# Altium schematic symbol library AI_NODE.SCHLIB: 18 symbols
Pins are listed as number, name and electrical type; pins without a type are passive.

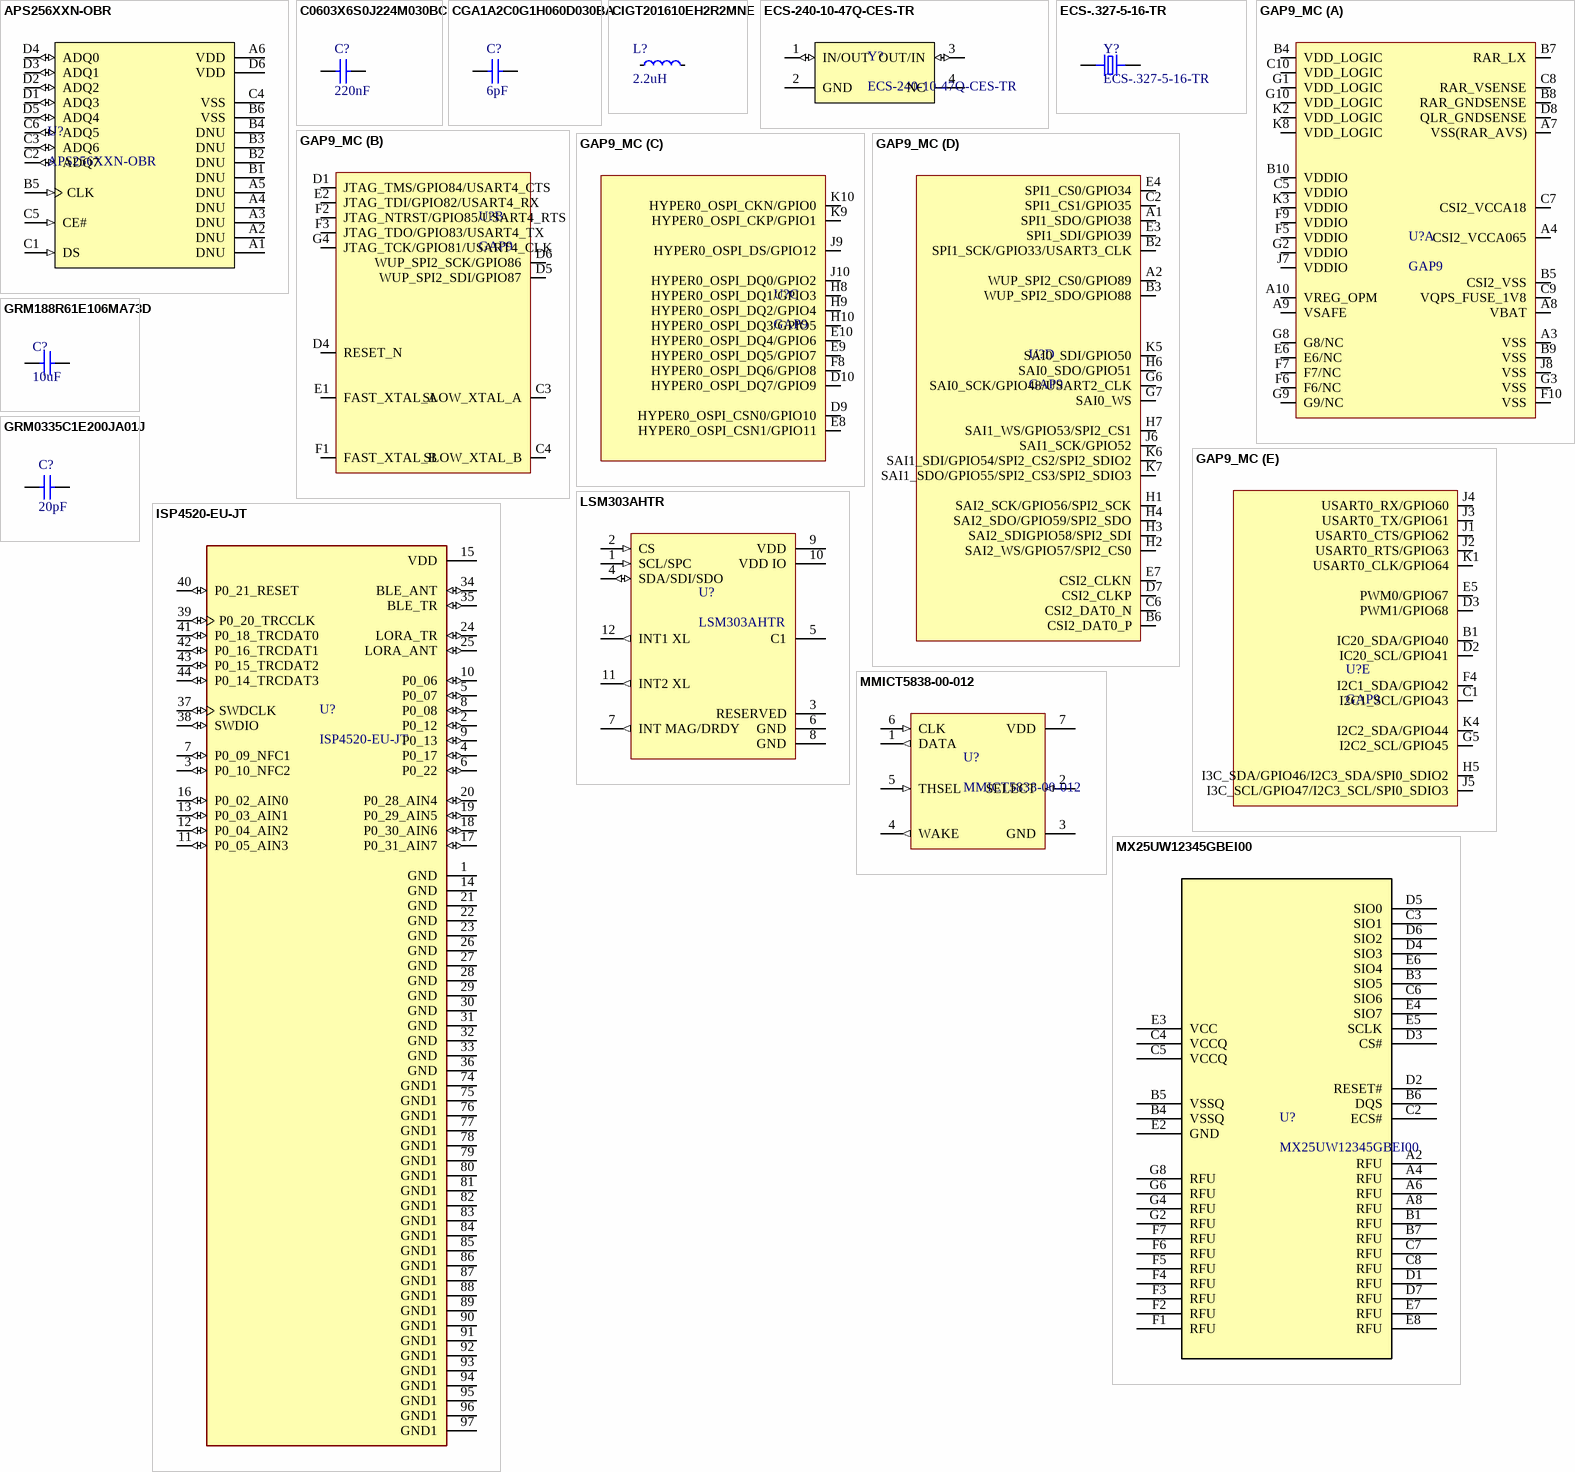
[diagram p0: symbols APS256XXN-OBR to MX25UW12345GBEI00]

## APS256XXN-OBR
designator U?
No Description Available; Mfr_Name: AP Memory; Manufacturer_Part_Number: APS256XXN-OBR-BG; Copyright: Copyright (C) 2022 Ultra Librarian. All rights reserved.; RefDes: RefDes; Type: DEV
footprint WLCSP24
pins: A1 DNU, A2 DNU, A3 DNU, A4 DNU, A5 DNU, A6 VDD, B1 DNU, B2 DNU, B3 DNU, B4 DNU, B5 CLK (in), B6 VSS, C1 DS (in), C2 ADQ7 (io), C3 ADQ6 (io), C4 VSS, C5 CE# (in), C6 ADQ5 (io), D1 ADQ3 (io), D2 ADQ2 (io), D3 ADQ1 (io), D4 ADQ0 (io), D5 ADQ4 (io), D6 VDD

## C0603X6S0J224M030BC
designator C?, comment 220nF
CAP CER 0.22UF 6.3V X6S 0201; Manufacturer: TDK; Manufacturer Part Number: C0603X6S0J224M030BC; Dielectric Material: Ceramic; Tolerance: 20%; Supplier: Digi-Key; Supplier Part Number: 445-8003-6-ND; RoHS: Yes; Category: Ceramic Capacitors; Stock: 29480; Pricing: 1=0.18, 10=0.121, 50=0.0728, 100=0.0614, 500=0.04202, 1000=0.03717, 2500=0.03555, 5000=0.03232 (USD); Mounting Technology: Surface Mount; Case/Package: 0201; Case Code (Metric): 0603; Case Code (Imperial): 0201; Min Operating Temperature: -55°C; Max Operating Temperature: 105°C; Packaging: Tape and Reel; Value: 220nF; Dielectric: X6S; Package Quantity: 1; Voltage Rating: 6.3V; Series: C; Construction: Flat; Length: 0.6mm; Width: 0.012inch; Height: 0.3mm; Depth: 0.3mm; Thickness: 300um; Radiation Hardening: No; Reach SVHC Compliant: No; Lead Free: Lead Free; RoHS Compliant: Yes; ComponentLink1URL: https://datasheet.ciiva.com/26919/getdatasheetpartid-754557-26919175.pdf?src-supplier=Verical; ComponentLink1Description: https://datasheet.ciiva.com/26919/getdatasheetpartid-754557-26919175.pdf?src-supplier=Verical; ComponentLink2URL: https://datasheet.ciiva.com/6291/tdkmlcccaprange-6291929.pdf?src-supplier=Digi-Key; ComponentLink2Description: https://datasheet.ciiva.com/6291/tdkmlcccaprange-6291929.pdf?src-supplier=Digi-Key; ComponentLink3URL: https://datasheet.ciiva.com/6291/tdkmlcccaprange-6291931.pdf?src-supplier=Digi-Key; ComponentLink3Description: https://datasheet.ciiva.com/6291/tdkmlcccaprange-6291931.pdf?src-supplier=Digi-Key; ComponentLink4URL: https://datasheet.ciiva.com/6291/tdkmlcccaprange-6291933.pdf?src-supplier=Digi-Key; ComponentLink4Description: https://datasheet.ciiva.com/6291/tdkmlcccaprange-6291933.pdf?src-supplier=Digi-Key
footprint CAPC0603X33X15LL03T05 (Chip Capacitor, 2-Leads, Body 0.60x0.30mm, IPC High Density)
footprint CAPC0603X33X15NL03T05 (Chip Capacitor, 2-Leads, Body 0.60x0.30mm, IPC Medium Density)
footprint CAPC0603X33X15ML03T05 (Chip Capacitor, 2-Leads, Body 0.60x0.30mm, IPC Low Density)
pins: 1, 2
1 alternate drawing of the same symbol

## CGA1A2C0G1H060D030BA
designator C?, comment 6pF
Cap Ceramic 6pF 50V C0G 0.5pF SMD 0201 125°C Punched Paper T/R; Manufacturer: TDK; Manufacturer Part Number: CGA1A2C0G1H060D030BA; Supplier: Digi-Key; Supplier Part Number: 445-12055-6-ND; RoHS: Yes; Category: Ceramic Capacitors; Stock: 28912; Pricing: 1=0.11, 10=0.078, 50=0.0424, 100=0.0346, 500=0.02474, 1000=0.01944, 2500=0.01768, 5000=0.01626 (USD); Mounting Technology: Surface Mount; Case/Package: 0201; Case Code (Imperial): 0201; Case Code (Metric): 0603; Weight: 6E-06oz; Min Operating Temperature: -55°C; Max Operating Temperature: 125°C; Voltage Rating (DC): 50V; Packaging: Tape and Reel; Package Quantity: 15000; Value: 6pF; Voltage Rating: 50V; Dielectric: C0G; Termination: SMD/SMT; Series: CGA; Length: 0.024inch; Width: 0.012inch; Height: 0.3mm; Thickness: 0.012inch; Ratings: AEC-Q200; RoHS Compliant: Yes; ComponentLink1URL: http://www.mouser.com/ds/2/400/lcc_automotive_general_en-843974.pdf?src-supplier=Mouser; ComponentLink1Description: http://www.mouser.com/ds/2/400/lcc_automotive_general_en-843974.pdf?src-supplier=Mouser; ComponentLink2URL: https://product.tdk.com/info/en/documents/chara_sheet/CGA1A2C0G1H060D030BA.pdf?src-supplier=Digi-Key; ComponentLink2Description: https://product.tdk.com/info/en/documents/chara_sheet/CGA1A2C0G1H060D030BA.pdf?src-supplier=Digi-Key; ComponentLink3URL: https://product.tdk.com/info/en/catalog/datasheets/mlcc_automotive_general_en.pdf?src-supplier=Digi-Key; ComponentLink3Description: https://product.tdk.com/info/en/catalog/datasheets/mlcc_automotive_general_en.pdf?src-supplier=Digi-Key; ComponentLink4URL: http://product.tdk.com/capacitor/mlcc/en/documents/mlcc_automotive_general_en.pdf?src-supplier=Avnet; ComponentLink4Description: http://product.tdk.com/capacitor/mlcc/en/documents/mlcc_automotive_general_en.pdf?src-supplier=Avnet
footprint CAPC0603X33X15LL03T05 (Chip Capacitor, 2-Leads, Body 0.60x0.30mm, IPC High Density)
footprint CAPC0603X33X15NL03T05 (Chip Capacitor, 2-Leads, Body 0.60x0.30mm, IPC Medium Density)
footprint CAPC0603X33X15ML03T05 (Chip Capacitor, 2-Leads, Body 0.60x0.30mm, IPC Low Density)
pins: 1, 2
1 alternate drawing of the same symbol

## CIGT201610EH2R2MNE
designator L?, comment 2.2uH
Power Inductor : LxW size(mm) 2016 Thickness1 Inductance (uH) 20%: 2.2; Manufacturer: Samsung; Manufacturer Part Number: CIGT201610EH2R2MNE; Core Material: Metal,Composite; Tolerance: 20%; Saturation Current: 2.9A; Shielding: Unshielded; DC Resistance (DCR): 87mR; Test Frequency: 1MHz; Supplier: Digi-Key; Supplier Part Number: 1276-6901-6-ND; RoHS: Yes; Category: Fixed Inductors; Stock: 353238; Pricing: 1=0.28, 10=0.252, 25=0.2204, 50=0.189, 100=0.1733, 250=0.15756, 500=0.1481, 1000=0.11344 (USD); Mounting Technology: Surface Mount; Case/Package: 0806; Case Code (Imperial): 0806; Case Code (Metric): 2016; Min Operating Temperature: -40°C; Max Operating Temperature: 125°C; Packaging: Cut Tape; Value: 2.2uH; Series: CIGT; RoHS Compliant: Yes; ComponentLink1URL: http://www.samsungsem.com/kr/support/product-search/inductor/CIGT201610EH2R2MNE.jsp?src-supplier=Digi-Key; ComponentLink1Description: http://www.samsungsem.com/kr/support/product-search/inductor/CIGT201610EH2R2MNE.jsp?src-supplier=Digi-Key
footprint INDC2016X10N
pins: 1, 2

## ECS-240-10-47Q-CES-TR
designator Y?
24MHz Â±10ppm Crystal 10pF 150 Ohms 4-SMD, No Lead; MF: ECS Inc.; Value: *; SnapEDA_Link: https://www.snapeda.com/parts/ECS-240-10-47Q-CES-TR/ECS%20Inc./view-part/4221464/?ref=snap; Price: None; Availability: Unavailable; Package: SMD-4 ECS International; MP: ECS-240-10-47Q-CES-TR
footprint XTAL_ECS-240-10-47Q-CES-TR
pins: 1 IN/OUT (io), 2 GND, 3 OUT/IN (io), 4 NC

## ECS-.327-5-16-TR
designator Y?
32.768kHz Â±20ppm Crystal 9pF 90 kOhms 2-SMD, No Lead; MF: ECS Inc.; MP: ECS-.327-9-16-TR; Value: *; SnapEDA_Link: https://www.snapeda.com/parts/ECS-.327-9-16-TR/ECS%20Inc./view-part/620864/?ref=snap; DigiKey-Purchase-URL: https://snapeda.com/shop?store=DigiKey&id=620864; Package: SMD-2 ECS International; Digi-Key_Part_Number: XC2132CT-ND
footprint XTAL_ECS-.327-5-16-TR
pins: 1, 2

## GAP9_MC
designator U?, comment GAP9
footprint GAP9
part A pins: A3 VSS, A4 CSI2_VCCA065, A7 VSS(RAR_AVS), A8 VBAT, A9 VSAFE, A10 VREG_OPM, B4 VDD_LOGIC, B5 CSI2_VSS, B7 RAR_LX, B8 RAR_GNDSENSE, B9 VSS, B10 VDDIO, C5 VDDIO, C7 CSI2_VCCA18, C8 RAR_VSENSE, C9 VQPS_FUSE_1V8, C10 VDD_LOGIC, D8 QLR_GNDSENSE, E6 E6/NC, F5 VDDIO, F6 F6/NC, F7 F7/NC, F9 VDDIO, F10 VSS, G1 VDD_LOGIC, G2 VDDIO, G3 VSS, G8 G8/NC, G9 G9/NC, G10 VDD_LOGIC, J7 VDDIO, J8 VSS, K2 VDD_LOGIC, K3 VDDIO, K8 VDD_LOGIC
part B pins: C3 SLOW_XTAL_A, C4 SLOW_XTAL_B, D1 JTAG_TMS/GPIO84/USART4_CTS, D4 RESET_N, D5 WUP_SPI2_SDI/GPIO87, D6 WUP_SPI2_SCK/GPIO86, E1 FAST_XTAL_A, E2 JTAG_TDI/GPIO82/USART4_RX, F1 FAST_XTAL_B, F2 JTAG_NTRST/GPIO85/USART4_RTS, F3 JTAG_TDO/GPIO83/USART4_TX, G4 JTAG_TCK/GPIO81/USART4_CLK
part C pins: D9 HYPER0_OSPI_CSN0/GPIO10, D10 HYPER0_OSPI_DQ7/GPIO9, E8 HYPER0_OSPI_CSN1/GPIO11, E9 HYPER0_OSPI_DQ5/GPIO7, E10 HYPER0_OSPI_DQ4/GPIO6, F8 HYPER0_OSPI_DQ6/GPIO8, H8 HYPER0_OSPI_DQ1/GPIO3, H9 HYPER0_OSPI_DQ2/GPIO4, H10 HYPER0_OSPI_DQ3/GPIO5, J9 HYPER0_OSPI_DS/GPIO12, J10 HYPER0_OSPI_DQ0/GPIO2, K9 HYPER0_OSPI_CKP/GPIO1, K10 HYPER0_OSPI_CKN/GPIO0
part D pins: A1 SPI1_SDO/GPIO38, A2 WUP_SPI2_CS0/GPIO89, B2 SPI1_SCK/GPIO33/USART3_CLK, B3 WUP_SPI2_SDO/GPIO88, B6 CSI2_DAT0_P, C2 SPI1_CS1/GPIO35, C6 CSI2_DAT0_N, D7 CSI2_CLKP, E3 SPI1_SDI/GPIO39, E4 SPI1_CS0/GPIO34, E7 CSI2_CLKN, G6 SAI0_SCK/GPIO48/USART2_CLK, G7 SAI0_WS, H1 SAI2_SCK/GPIO56/SPI2_SCK, H2 SAI2_WS/GPIO57/SPI2_CS0, H3 SAI2_SDIGPIO58/SPI2_SDI, H4 SAI2_SDO/GPIO59/SPI2_SDO, H6 SAI0_SDO/GPIO51, H7 SAI1_WS/GPIO53/SPI2_CS1, J6 SAI1_SCK/GPIO52, K5 SAI0_SDI/GPIO50, K6 SAI1_SDI/GPIO54/SPI2_CS2/SPI2_SDIO2, K7 SAI1_SDO/GPIO55/SPI2_CS3/SPI2_SDIO3
part E pins: B1 IC20_SDA/GPIO40, C1 I2C1_SCL/GPIO43, D2 IC20_SCL/GPIO41, D3 PWM1/GPIO68, E5 PWM0/GPIO67, F4 I2C1_SDA/GPIO42, G5 I2C2_SCL/GPIO45, H5 I3C_SDA/GPIO46/I2C3_SDA/SPI0_SDIO2, J1 USART0_CTS/GPIO62, J2 USART0_RTS/GPIO63, J3 USART0_TX/GPIO61, J4 USART0_RX/GPIO60, J5 I3C_SCL/GPIO47/I2C3_SCL/SPI0_SDIO3, K1 USART0_CLK/GPIO64, K4 I2C2_SDA/GPIO44

## GRM188R61E106MA73D
designator C?, comment 10uF
CAP CER 10UF 25V X5R 0603; Manufacturer: Murata; Manufacturer Part Number: GRM188R61E106MA73D; Supplier: Digi-Key; Supplier Part Number: 490-7202-6-ND; RoHS: Yes; Category: Ceramic Capacitors; Stock: 3353344; Pricing: 1=0.26, 10=0.176, 50=0.1176, 100=0.0999, 500=0.07054, 1000=0.06173 (USD); ComponentLink1URL: https://datasheet.ciiva.com/14906/partnumbering-e-01-14906429.pdf?src-supplier=Digi-Key; ComponentLink1Description: https://datasheet.ciiva.com/14906/partnumbering-e-01-14906429.pdf?src-supplier=Digi-Key; ComponentLink2URL: https://datasheet.ciiva.com/14906/partnumbering-e-01-14906431.pdf?src-supplier=Digi-Key; ComponentLink2Description: https://datasheet.ciiva.com/14906/partnumbering-e-01-14906431.pdf?src-supplier=Digi-Key; ComponentLink3URL: https://datasheet.ciiva.com/22776/608985-22776426.pdf?src-supplier=Farnell; ComponentLink3Description: https://datasheet.ciiva.com/22776/608985-22776426.pdf?src-supplier=Farnell; ComponentLink4URL: https://datasheet.ciiva.com/22776/c02e-22776427.pdf?src-supplier=Farnell; ComponentLink4Description: https://datasheet.ciiva.com/22776/c02e-22776427.pdf?src-supplier=Farnell; ComponentLink5URL: https://datasheet.ciiva.com/22619/c02e-22619674.pdf?src-supplier=Element14; ComponentLink5Description: https://datasheet.ciiva.com/22619/c02e-22619674.pdf?src-supplier=Element14
footprint FP-GRM188-0_2-IPC_A
footprint FP-GRM188-0_2-IPC_B
footprint FP-GRM188-0_2-IPC_C
footprint FP-GRM188-0_2-MFG
pins: 1, 2

## GRM0335C1E200JA01J
designator C?, comment 20pF
Cap Cer 20PF 25V NP0 0201; Manufacturer: Murata; Manufacturer Part Number: GRM0335C1E200JA01J; Tolerance: 5%; Dielectric: C0G; Supplier: Digi-Key; Supplier Part Number: GRM0335C1E200JA01J-ND; RoHS: Yes; Category: Ceramic Capacitors; Pricing: 50000=0.00155 (USD); Mounting Technology: Surface Mount; Case/Package: 0201; Case Code (Imperial): 0201; Case Code (Metric): 0603; Min Operating Temperature: -55°C; Max Operating Temperature: 125°C; Voltage Rating: 25V; Value: 20pF; Voltage Rating (DC): 25V; Packaging: Tape and Reel; Package Quantity: 50000; Termination: SMD/SMT; Series: GRM; Length: 0.6mm; Width: 0.3mm; Height: 0.3mm; RoHS Compliant: Yes; ComponentLink1URL: https://datasheet.ciiva.com/29539/partnumbering-e-01-29539003.pdf?src-supplier=Digi-Key; ComponentLink1Description: https://datasheet.ciiva.com/29539/partnumbering-e-01-29539003.pdf?src-supplier=Digi-Key
footprint CAPC0603X33X15LL03T05 (Chip Capacitor, 2-Leads, Body 0.60x0.30mm, IPC High Density)
footprint CAPC0603X33X15NL03T05 (Chip Capacitor, 2-Leads, Body 0.60x0.30mm, IPC Medium Density)
footprint CAPC0603X33X15ML03T05 (Chip Capacitor, 2-Leads, Body 0.60x0.30mm, IPC Low Density)
pins: 1, 2
1 alternate drawing of the same symbol

## ISP4520-EU-JT
designator U?
RF Modules; MF: Insight SiP; Availability: Unavailable; Package: None; Price: None; SnapEDA_Link: https://www.snapeda.com/parts/ISP4520-EU-JT/Insight%20SiP/view-part/4481343/?ref=snap; Value: *; MP: ISP4520-EU-JT; Supplier: Digi-Key; Supplier Part Number: 1786-ISP4520-EU-ST-ND
footprint XCVR_ISP4520-EU-JT
pins: 1 GND (power), 2 P0_12 (io), 3 P0_10_NFC2 (io), 4 P0_17 (io), 5 P0_07 (io), 6 P0_22 (io), 7 P0_09_NFC1 (io), 8 P0_08 (io), 9 P0_13 (io), 10 P0_06 (io), 11 P0_05_AIN3 (io), 12 P0_04_AIN2 (io), 13 P0_03_AIN1 (io), 14 GND (power), 15 VDD (power), 16 P0_02_AIN0 (io), 17 P0_31_AIN7 (io), 18 P0_30_AIN6 (io), 19 P0_29_AIN5 (io), 20 P0_28_AIN4 (io), 21 GND (power), 22 GND (power), 23 GND (power), 24 LORA_TR (io), 25 LORA_ANT (io), 26 GND (power), 27 GND (power), 28 GND (power), 29 GND (power), 30 GND (power), 31 GND (power), 32 GND (power), 33 GND (power), 34 BLE_ANT (io), 35 BLE_TR (io), 36 GND (power), 37 SWDCLK (io), 38 SWDIO (io), 39 P0_20_TRCCLK (io), 40 P0_21_RESET (io), 41 P0_18_TRCDAT0 (io), 42 P0_16_TRCDAT1 (io), 43 P0_15_TRCDAT2 (io), 44 P0_14_TRCDAT3 (io), 74 GND1 (power), 75 GND1 (power), 76 GND1 (power), 77 GND1 (power), 78 GND1 (power), 79 GND1 (power), 80 GND1 (power), 81 GND1 (power), 82 GND1 (power), 83 GND1 (power), 84 GND1 (power), 85 GND1 (power), 86 GND1 (power), 87 GND1 (power), 88 GND1 (power), 89 GND1 (power), 90 GND1 (power), 91 GND1 (power), 92 GND1 (power), 93 GND1 (power), 94 GND1 (power), 95 GND1 (power), 96 GND1 (power), 97 GND1 (power)

## LSM303AHTR
designator U?
e-Compass: 3D digital accelerometer, 3D digital magnetometer, LGA-2X2X1-12LD, RoHS; Manufacturer: STMicroelectronics; Supplier: Digi-Key; Supplier Part Number: 497-17053-6-ND; Manufacturer Part Number: LSM303AHTR; RoHS: Yes; Category: Inertial Measurement Units (IMUs); Stock: 7747; Pricing: 1=5.29, 10=3.968, 25=3.5272, 50=3.3508, 100=3.2627, 500=2.73362, 1000=2.55726 (USD); ComponentLink1URL: http://www.farnell.com/datasheets/2581668.pdf?src-supplier=Farnell; ComponentLink1Description: http://www.farnell.com/datasheets/2581668.pdf?src-supplier=Farnell; ComponentLink2URL: https://datasheet.octopart.com/LSM303AHTR-STMicroelectronics-datasheet-141402779.pdf?src-supplier=Element14; ComponentLink2Description: https://datasheet.octopart.com/LSM303AHTR-STMicroelectronics-datasheet-141402779.pdf?src-supplier=Element14; ComponentLink3URL: http://www.farnell.com/datasheets/2581668.pdf?src-supplier=Newark; ComponentLink3Description: http://www.farnell.com/datasheets/2581668.pdf?src-supplier=Newark; ComponentLink4URL: http://www.st.com/content/ccc/resource/technical/document/datasheet/1b/a1/fd/09/9f/41/44/cf/DM00177690.pdf/files/DM00177690.pdf/jcr:content/translations/en.DM00177690.pdf?src-supplier=Digi-Key; ComponentLink4Description: http://www.st.com/content/ccc/resource/technical/document/datasheet/1b/a1/fd/09/9f/41/44/cf/DM00177690.pdf/files/DM00177690.pdf/jcr:content/translations/en.DM00177690.pdf?src-supplier=Digi-Key
footprint FP-LGA12-8487206-MFG
pins: 1 SCL/SPC (in), 2 CS (in), 3 RESERVED, 4 SDA/SDI/SDO (io), 5 C1, 6 GND (power), 7 INT MAG/DRDY (out), 8 GND (power), 9 VDD (power), 10 VDD IO (power), 11 INT2 XL (out), 12 INT1 XL (out)

## MMICT5838-00-012
designator U?
Coming Soon: Bottom Port PDM Digital Output Multi-Mode Output; Manufacturer: TDK InvenSense; Supplier: Digi-Key; Supplier Part Number: 1428-MMICT5838-00-012CT-ND; Manufacturer Part Number: MMICT5838-00-012; RoHS: No; Stock: 9900; Pricing: 1=2.51, 10=2.076, 25=1.9164, 50=1.8004, 100=1.689, 500=1.44702, 1000=1.43117 (USD); ComponentLink1URL: https://datasheet.octopart.com/MMICT5838-00-012-InvenSense-datasheet-165589132.pdf?src-supplier=Component+Distributors+Inc.; ComponentLink1Description: https://datasheet.octopart.com/MMICT5838-00-012-InvenSense-datasheet-165589132.pdf?src-supplier=Component+Distributors+Inc.
footprint T5838
footprint T5838 - RF
pins: 1 DATA (out), 2 SELECT (in), 3 GND, 4 WAKE (out), 5 THSEL (in), 6 CLK (in), 7 VDD

## MX25UW12345GBEI00
designator U?
Macronix 128 Mbit PSRAM
footprint MX25UW12345GBEI00 (128Mbit Flash)
pins: A2 RFU, A4 RFU, A6 RFU, A8 RFU, B1 RFU, B3 SIO5, B4 VSSQ, B5 VSSQ, B6 DQS, B7 RFU, C2 ECS#, C3 SIO1, C4 VCCQ, C5 VCCQ, C6 SIO6, C7 RFU, C8 RFU, D1 RFU, D2 RESET#, D3 CS#, D4 SIO3, D5 SIO0, D6 SIO2, D7 RFU, E2 GND, E3 VCC, E4 SIO7, E5 SCLK, E6 SIO4, E7 RFU, E8 RFU, F1 RFU, F2 RFU, F3 RFU, F4 RFU, F5 RFU, F6 RFU, F7 RFU, G2 RFU, G4 RFU, G6 RFU, G8 RFU

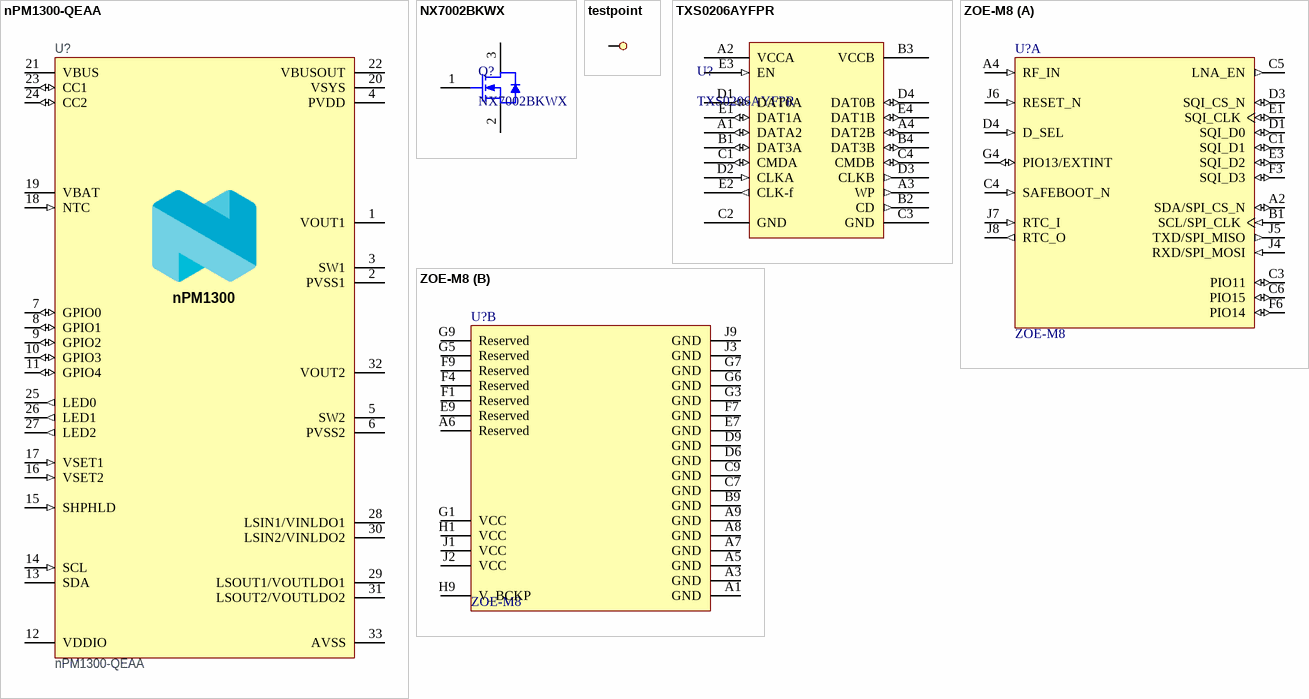
[diagram p1: symbols nPM1300-QEAA to ZOE-M8]

## nPM1300-QEAA
designator U?
Li-Ion/Li-Polymer USB-C battery charger with high efficiency buck regulators, LDOs or load switches, LED drivers, TWI and VBUSOUT; Manufacturer: Nordic Semiconductor; Part number NEMS: 102000252; Component Status: Active; Pad Count: 33; Note: N.A.; Part Number: nPM1300-QEAA; PartId: 102000252; Component Class: nRF_Devices; Author: eisk; Manufacturer Part Number: nPM1300-QEAA; ComponentLink1URL: N.A.; ComponentLink1Description: Datasheet; ComponentLink2URL: N.A.; ComponentLink2Description: Supplier link; HelpURL: N.A.; LatestRevisionDate: 2022-11-14; Published: 2022-02-17; Footprint Doc: QFN-32; Value: nPM1300-QEAA; Supplier 1: Nordic Semiconductor; Supplier Part Number 1: nPM1300-QEAA; Supplier 2: N.A.; Supplier Part Number 2: N.A.; Artikkelnr Noca: N.A.; Part number IPS: N.A.; Part number Norautron: N.A.
footprint Nordic_QFN50P500X500X90-33N
pins: 1 VOUT1 (power), 2 PVSS1 (power), 3 SW1 (power), 4 PVDD (power), 5 SW2 (power), 6 PVSS2 (power), 7 GPIO0 (io), 8 GPIO1 (io), 9 GPIO2 (io), 10 GPIO3 (io), 11 GPIO4 (io), 12 VDDIO (power), 13 SDA (oc), 14 SCL (in), 15 SHPHLD (in), 16 VSET2 (in), 17 VSET1 (in), 18 NTC (in), 19 VBAT, 20 VSYS (power), 21 VBUS (power), 22 VBUSOUT (power), 23 CC1 (io), 24 CC2 (io), 25 LED0 (out), 26 LED1 (out), 27 LED2 (out), 28 LSIN1/VINLDO1 (power), 29 LSOUT1/VOUTLDO1 (power), 30 LSIN2/VINLDO2 (power), 31 LSOUT2/VOUTLDO2 (power), 32 VOUT2 (power), 33 AVSS (power)
text: nPM1300

## NX7002BKWX
designator Q?
NX7002BKW/SC-70/REEL 7 Q1/T1; Manufacturer: NXP Semiconductors; Drain to Source Voltage (Vdss): 60V; Continuous Drain Current (ID): 270mA; Rds On Max: 2.8R; Input Capacitance: 23.6pF; Max Power Dissipation: 310mW; Supplier 1: Digi-Key; Manufacturer Part Number: NX7002BKWX; RoHS: Yes; Category: MOSFETs; Stock 1: 16065; Pricing 1: 1=0.12000, 10=0.10500, 25=0.10000, 100=0.04400, 500=0.03456, 1000=0.02400 (USD); Mount: Surface Mount; Case/Package: SC; Min Operating Temperature: -55°C; Max Operating Temperature: 150°C; Packaging: Tape and Reel; ComponentLink1URL: http://www.farnell.com/datasheets/2043677.pdf?src-supplier=Farnell; ComponentLink1Description: http://www.farnell.com/datasheets/2043677.pdf?src-supplier=Farnell; Supplier Part Number 1: 568-13170-1-ND
footprint SC-70 (SOT323) (SOT323, 3-Leads, Body 2.00x2.00mm (avg), Pitch 1.30mm, IPC Medium Density)
pins: 1 G "gate", 2 S "source", 3 D "drain"

## testpoint
designator 1  (value not drawn)
footprint testpoint
pins: 1

## TXS0206AYFPR
designator U?
SD Card Voltage Translation Transceiver 20-Pin DSBGA T/R; Manufacturer: Texas Instruments; Max Supply Voltage: 3.6V; Min Supply Voltage: 1.1V; Data Rate: 60Mbps; Number of Channels: 4; Propagation Delay: 3.2ns; Channel Type: Bidirectional; Number of Circuits: 1; Logic Function: Translator; Supplier 1: Digi-Key; Manufacturer Part Number: TXS0206AYFPR; RoHS: Yes; Category: Interface ICs; Stock 1: 2864; Pricing 1: 1=1.65000, 10=1.47100, 25=1.39600, 100=1.14660, 250=1.07180, 500=0.94718, 1000=0.74778 (USD); Mount: Surface Mount; Number of Pins: 20; Min Operating Temperature: -40°C; Max Operating Temperature: 85°C; Package Quantity: 3000; Packaging: Tape and Reel; Number of Bits: 4; Output Type: Voltage; Radiation Hardening: No; Lead Free: Lead Free; ComponentLink1URL: https://datasheet.ciiva.com/12253/sces833a-127327-12253648.pdf?src-supplier=Mouser; ComponentLink1Description: https://datasheet.ciiva.com/12253/sces833a-127327-12253648.pdf?src-supplier=Mouser; ComponentLink2URL: https://datasheet.ciiva.com/14194/txs0206a-14194885.pdf?src-supplier=Avnet; ComponentLink2Description: https://datasheet.ciiva.com/14194/txs0206a-14194885.pdf?src-supplier=Avnet; ComponentLink3URL: https://datasheet.ciiva.com/29616/txs0206a-29616010.pdf?src-supplier=Digi-Key; ComponentLink3Description: https://datasheet.ciiva.com/29616/txs0206a-29616010.pdf?src-supplier=Digi-Key; ComponentLink4URL: https://datasheet.ciiva.com/29616/txs0206a-29616011.pdf?src-supplier=Digi-Key; ComponentLink4Description: https://datasheet.ciiva.com/29616/txs0206a-29616011.pdf?src-supplier=Digi-Key; Supplier Part Number 1: 296-36872-1-ND
footprint BGA9C40P4X5_156X196X50 (BGA, 9-Leads, Body 1.56x1.96mmx0.50mm, Pitch 0.40mm)
pins: A1 DATA2 (io), A2 VCCA (power), A3 WP (out), A4 DAT2B (io), B1 DAT3A (io), B2 CD (out), B3 VCCB (power), B4 DAT3B (io), C1 CMDA (io), C2 GND, C3 GND, C4 CMDB (io), D1 DAT0A (io), D2 CLKA (in), D3 CLKB (out), D4 DAT0B (io), E1 DAT1A (io), E2 CLK-f (out), E3 EN (in), E4 DAT1B (io)

## ZOE-M8
designator U?
u-blox M8 low power concurrent GNSS S-LGA 1.8 V SiP, TCXO, ROM, 4.5x4.5 mm; Manufacturer Part Number: ZOE-M8B; Protocol: BeiDou, Galileo, GLONASS, GPS, GNSS; Sensitivity: -160dBm; Serial Interfaces: SPI, UART; Antenna Type: Not Included, Castellation; Voltage Supply: 1.71 V ~ 1.89 V; Current - Transmitting: 40mA; Manufacturer: u-blox; Mounting Type: Surface Mount; Operating Temperature: -40°C ~ 85°C; Package / Case: 51-SMD Module
footprint ZOE-M8B (LGA, 51-Leads, Body 4.50x4.50mmx1.20mm, Pitch 0.50mm)
part A pins: A2 SDA/SPI_CS_N (io), A4 RF_IN (in), B1 SCL/SPI_CLK (in), C1 SQI_D1 (io), C3 PIO11 (io), C4 SAFEBOOT_N (in), C5 LNA_EN (out), C6 PIO15 (io), D1 SQI_D0 (io), D3 SQI_CS_N (io), D4 D_SEL (in), E1 SQI_CLK (io), E3 SQI_D2 (io), F3 SQI_D3 (io), F6 PIO14 (io), G4 PIO13/EXTINT (io), J4 RXD/SPI_MOSI (in), J5 TXD/SPI_MISO (out), J6 RESET_N (in), J7 RTC_I (in), J8 RTC_O (out)
part B pins: A1 GND (power), A3 GND (power), A5 GND (power), A6 Reserved, A7 GND (power), A8 GND (power), A9 GND (power), B9 GND (power), C7 GND (power), C9 GND (power), D6 GND (power), D9 GND (power), E7 GND (power), E9 Reserved, F1 Reserved, F4 Reserved, F7 GND (power), F9 Reserved, G1 VCC (power), G3 GND (power), G5 Reserved, G6 GND (power), G7 GND (power), G9 Reserved, H1 VCC (power), H9 V_BCKP (power), J1 VCC (power), J2 VCC (power), J3 GND (power), J9 GND (power)